# Altium integrated library pca20072.IntLib: 63 symbols (part 1 of 2)
Pins are listed as number, name and electrical type; pins without a type are passive.

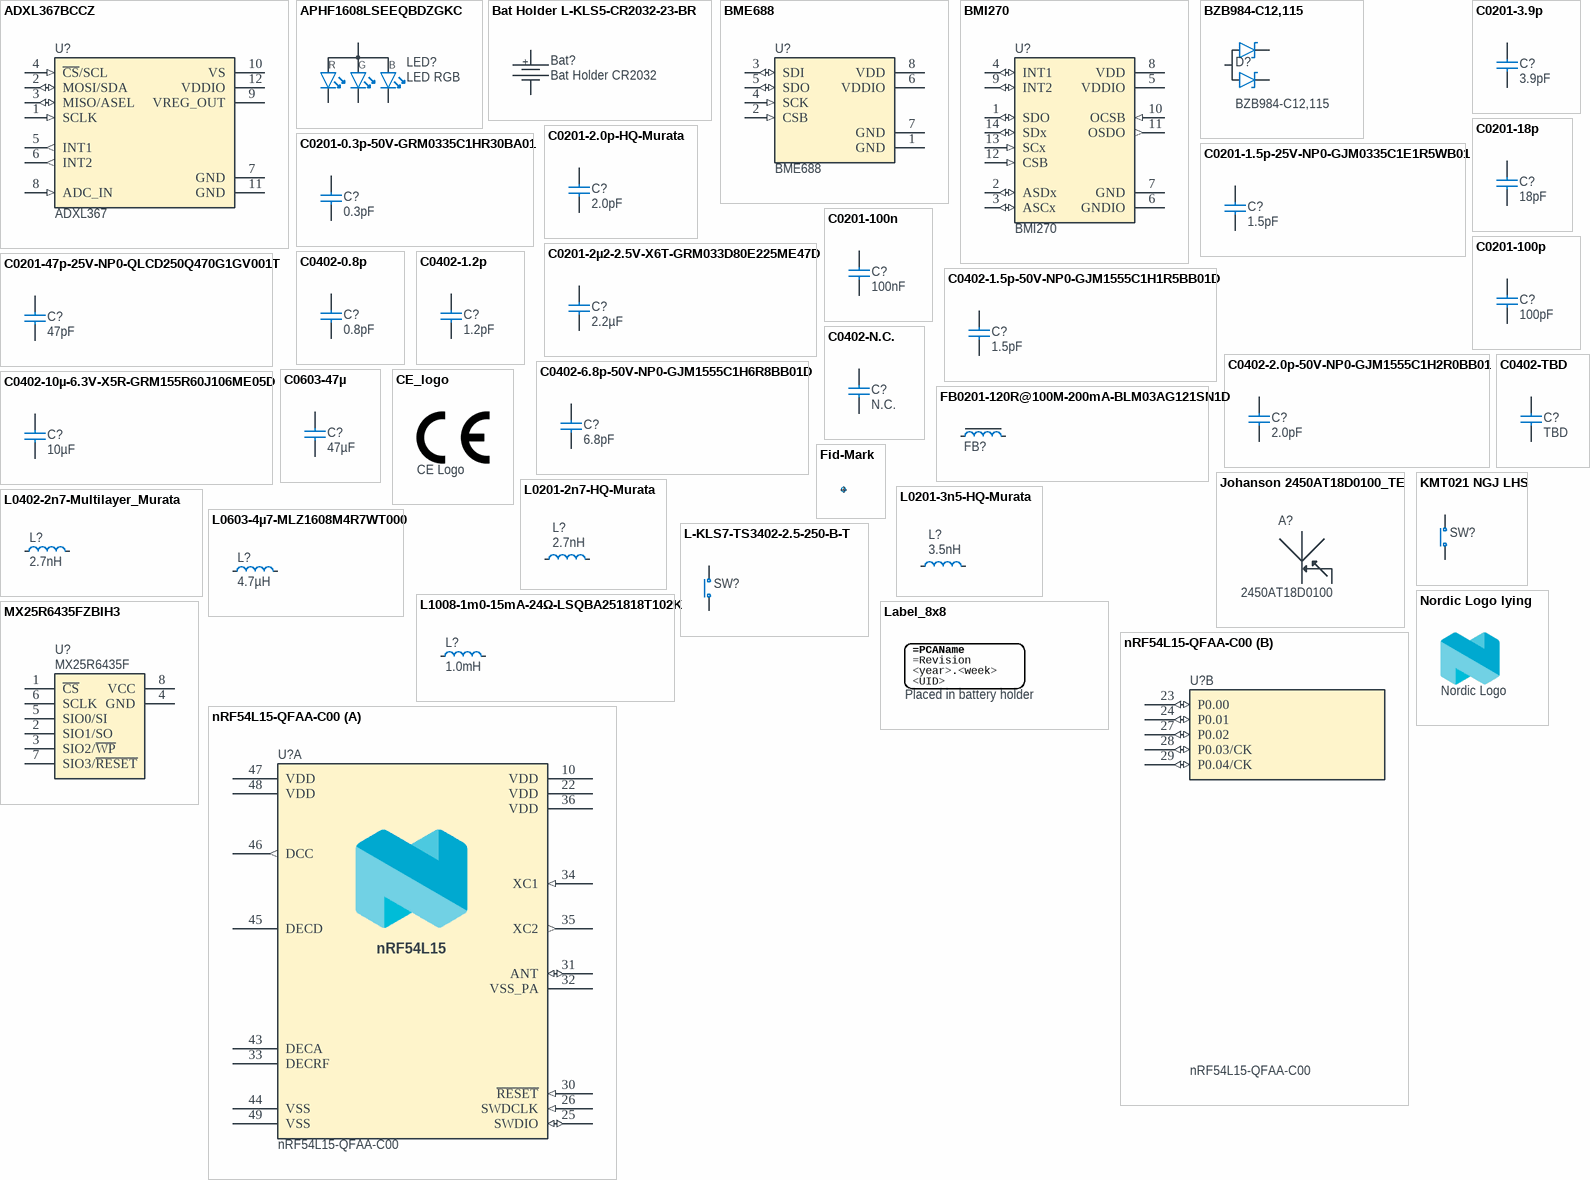
[diagram p0: symbols ADXL367BCCZ to nRF54L15-QFAA-C00]

## ADXL367BCCZ
designator U?, comment ADXL367
Micropower, 3-Axis, ±2 g/±4 g/±8 g Digital Output MEMS Accelerometer; Part Number: ADXL367BCCZ; Manufacturer: Analog Devices; Part number NEMS: 101900775; Note: N.A.; Component Status: Active; Pad Count: 12; Manufacturer Part Number: ADXL367BCCZ; ComponentLink1URL: http://www.analog.com/media/en/technical-documentation/data-sheets/ADXL367.pdf; ComponentLink1Description: Datasheet; ComponentLink2URL: https://www.digikey.com/en/products/detail/analog-devices-inc/ADXL367BCCZ-RL7/16360579; ComponentLink2Description: Supplier link; HelpURL: http://www.analog.com/en/products/ADXL367.html; Footprint Doc: LGA-12; LatestRevisionDate: 2023-04-03; Published: 2023-04-03; Value: ADXL367; Supplier 1: DigiKey; Supplier Part Number 1: 505-ADXL367BCCZ-RL7CT-ND; Supplier 2: Mouser; Supplier Part Number 2: 584-ADXL367BCCZ-RL7; Artikkelnr Noca: N.A.; Part number IPS: N.A.; Component Class: Misc_ICs; Author: rubr; Part number Norautron: N.A.; PartId: 101900775
footprint LGA50P220X230X97-12N
pins: 1 SCLK (in), 2 MOSI/SDA (io), 3 MISO/ASEL (io), 4 ~{CS}/SCL (in), 5 INT1 (out), 6 INT2 (out), 7 GND (power), 8 ADC_IN (in), 9 VREG_OUT (power), 10 VS (power), 11 GND (power), 12 VDDIO (power)

## APHF1608LSEEQBDZGKC
designator LED?, comment LED RGB
RGB LED 1.60 mm x 0.80 mm SMD; Part Number: APHF1608LSEEQBDZGKC; Manufacturer: Kingbright Company LLC; Part number IPS: 00000001254; Part number Norautron: 26470023; Part number NEMS: 101400123; Note: N.A.; Pad Count: 4; Component Status: Active; Manufacturer Part Number: APHF1608LSEEQBDZGKC; LatestRevisionDate: 2017-11-09; Published: 2017-09-18; Value: LED RGB; Artikkelnr Noca: N.A.; Footprint Doc: LED_RGB_0603; ComponentLink1Description: Datasheet; ComponentLink1URL: N.A.; ComponentLink2Description: Supplier link; ComponentLink2URL: N.A.; HelpURL: http://www.kingbrightusa.com/images/catalog/SPEC/APHF1608LSEEQBDZGKC.pdf; Supplier 1: DigiKey; Supplier Part Number 1: 754-2143-1-ND; Supplier 2: N.A.; Supplier Part Number 2: N.A.; PartId: 101400123; Component Class: Optoelectronics; Author: rsk
footprint LED_RGB_0603
pins: 1 C_RED, 2 C_GREEN, 3 C_BLUE, 4 A
text: R; G; B

## Bat Holder L-KLS5-CR2032-23-BR
designator Bat?, comment Bat Holder CR2032
Bat Holder CR2032 SMD; Part Number: Bat Holder L-KLS5-CR2032-23-BR; Manufacturer: KLS Electronic; Manufacturer Part Number: L-KLS5-CR2032-23-BR; Part number NEMS: 100500651; Component Status: Active; Pad Count: 2; Artikkelnr Noca: N.A.; System: Connector; PartId: 100500651; Component Class: Connectors; Author: rsk; ComponentLink1URL: http://www.klsele.com/admin/product_upload/20151124103736KLS5-CR2032-23-B.pdf; ComponentLink1Description: Datasheet; ComponentLink2URL: N.A.; ComponentLink2Description: Supplier link; HelpURL: http://www.klsele.com/products/connectors/Coin-Cell-Holders-Series/4685.html; LatestRevisionDate: 2025-09-19; Published: 2019-08-28; Footprint Doc: CR2032_HOLDER; Value: Bat Holder CR2032; Note: Bat Holder CR2032; Supplier 1: Milexia; Supplier Part Number 1: L-KLS5-CR2032-23-BR; Supplier 2: Mouser; Supplier Part Number 2: 614-SMTU2032-LF; Part number IPS: N.A.; Part number Norautron: N.A.
footprint L-KLS5-CR2032-23-B1
pins: 1, 2
text: +

## BME688
designator U?
Low power gas, pressure, temperature & humidity sensor; Manufacturer: Bosch; Part number NEMS: 101900619; Component Status: Active; Pad Count: 8; Note: N.A.; Part Number: BME688; PartId: 101900619; Component Class: Misc_ICs; Author: rsk; Manufacturer Part Number: BME688; ComponentLink1URL: https://www.bosch-sensortec.com/media/boschsensortec/downloads/datasheets/bst-bme688-ds000.pdf; ComponentLink1Description: Datasheet; ComponentLink2Description: Supplier link; HelpURL: https://www.bosch-sensortec.com/products/environmental-sensors/gas-sensors/bme688/; LatestRevisionDate: 2024-10-03; Published: 2020-07-07; Footprint Doc: LGA-8; Value: BME688; Supplier 1: DigiKey; Supplier Part Number 1: 828-BME688TR-ND; Supplier 2: N.A.; Supplier Part Number 2: N.A.; Artikkelnr Noca: N.A.; Part number IPS: N.A.; Part number Norautron: N.A.
footprint BME680
pins: 1 GND (power), 2 CSB (in), 3 SDI (io), 4 SCK (in), 5 SDO (io), 6 VDDIO (power) "1.2V - 3.6V", 7 GND (power), 8 VDD (power) "1.71V - 3.6V"

## BMI270
designator U?
6-axis, smart, low-power, inertial measurement unit; Manufacturer: Bosch; Part number NEMS: 101900620; Note: N.A.; Pad Count: 14; Component Status: Active; Part Number: BMI270; Manufacturer Part Number: BMI270; ComponentLink1URL: https://www.bosch-sensortec.com/media/boschsensortec/downloads/datasheets/bst-bmi270-ds000.pdf; ComponentLink1Description: Datasheet; ComponentLink2URL: https://www.bosch-sensortec.com/products/motion-sensors/imus/bmi270.html; ComponentLink2Description: Supplier link; HelpURL: https://www.bosch-sensortec.com/media/boschsensortec/downloads/datasheets/bst-bmi270-ds000.pdf; Footprint Doc: LGA-14; LatestRevisionDate: 2021-08-03; Published: 2020-07-07; Value: BMI270; Supplier 1: DigiKey; Supplier Part Number 1: 828-1091-1-ND; Supplier 2: Mouser; Supplier Part Number 2: 262-BMI270; Artikkelnr Noca: N.A.; Part number IPS: N.A.; Component Class: Misc_ICs; PartId: 101900620; Author: rsk; Part number Norautron: N.A.
footprint BMI270
pins: 1 SDO (io), 2 ASDx (io), 3 ASCx (io), 4 INT1 (io), 5 VDDIO (power), 6 GNDIO (power), 7 GND (power), 8 VDD (power), 9 INT2 (io), 10 OCSB (in), 11 OSDO (out), 12 CSB (in), 13 SCx (in), 14 SDx (io)

## BZB984-C12,115
designator D?
Zener Diode Array, 1 Pair, Common Anode, 12V, 265mW, ±5%; Manufacturer: Nexperia; Part number NEMS: 101300214; Component Status: Active; Pad Count: 3; Note: N.A.; Part Number: BZB984-C12,115; Component Class: Semiconductors; Author: rubr; Manufacturer Part Number: BZB984-C12,115; ComponentLink1URL: https://assets.nexperia.com/documents/data-sheet/BZB984_SER.pdf; ComponentLink1Description: Datasheet; ComponentLink2URL: https://www.digikey.com/en/products/detail/nexperia-usa-inc/BZB984-C12-115/1155439; ComponentLink2Description: Supplier link; HelpURL: https://www.nexperia.com/product/BZB984-C12; LatestRevisionDate: 2025-01-30; Published: 2025-01-30; Footprint Doc: SOT-663; Value: BZB984-C12,115; Supplier 1: DigiKey; Supplier Part Number 1: 1727-1585-1-ND; Supplier 2: N.A.; Supplier Part Number 2: N.A.; Artikkelnr Noca: N.A.; Part number IPS: N.A.; Part number Norautron: N.A.; PartId: 101300214
footprint SOTFL50P160X60-3L
pins: 1 K1, 2 K2, 3 CA
1 alternate drawing of the same symbol

## C0201-0.3p-50V-GRM0335C1HR30BA01
designator C?, comment 0.3pF
Capacitor, C0G, ±0.1pF, 50V; Part Number: C0201-0.3p-50V-GRM0335C1HR30BA01; Manufacturer: Murata; Manufacturer Part Number: GRM0335C1HR30BA01; Part number NEMS: 100200650; Component Status: Active; Pad Count: 2; Artikkelnr Noca: N.A.; PartId: 100200650; Component Class: Capacitors; Author: masi; ComponentLink1URL: https://www.murata.com/en-global/products/productdetail?partno=GRM0335C1HR30BA01%23; ComponentLink1Description: Datasheet; ComponentLink2URL: N.A.; ComponentLink2Description: Supplier link; HelpURL: N.A.; LatestRevisionDate: 2024-01-10; Published: 2024-01-10; Footprint Doc: 0201; Value: 0.3pF; Note: 50V; Supplier 1: DigiKey; Supplier Part Number 1: 490-6135-2-ND; Supplier 2: Mouser; Supplier Part Number 2: 81-GRM0335C1HR30BA1D; Part number IPS: N.A.; Part number Norautron: N.A.
footprint CAPC0603X03L_C
pins: 1, 2

## C0201-1.5p-25V-NP0-GJM0335C1E1R5WB01
designator C?, comment 1.5pF
Capacitor, NP0, ±0.05pF, 25V, High Q; Part Number: C0201-1.5p-25V-NP0-GJM0335C1E1R5WB01; Manufacturer: Murata; Manufacturer Part Number: GJM0335C1E1R5WB01; Part number NEMS: 100200477; Component Status: Active; Pad Count: 2; Artikkelnr Noca: N.A.; PartId: 100200477; Component Class: Capacitors; Author: masi; ComponentLink1URL: https://search.murata.co.jp/Ceramy/image/img/A01X/G101/ENG/GJM0335C1E1R5WB01-01.pdf; ComponentLink1Description: Datasheet; ComponentLink2URL: N.A.; ComponentLink2Description: Supplier link; HelpURL: https://www.murata.com/products/productdetail?partno=GJM0335C1E1R5WB01%23; LatestRevisionDate: 2021-06-15; Published: 2021-06-15; Footprint Doc: 0201; Value: 1.5pF; Note: 25V; Supplier 1: DigiKey; Supplier Part Number 1: 490-11176-2-ND; Supplier 2: Mouser; Supplier Part Number 2: 81-GJM0335C1E1R5WB1D; Part number IPS: N.A.; Part number Norautron: N.A.
footprint CAPC0603X03L_C
pins: 1, 2

## C0201-2.0p-HQ-Murata
designator C?, comment 2.0pF
Capacitor, NP0, ±0.05pF, 25V; Part Number: C0201-2.0p-HQ-Murata; Manufacturer: Murata; Manufacturer Part Number: GJM0335C1E2R0WB01; Part number IPS: 00000001775; Part number NEMS: 100200419; Component Status: Active; Pad Count: 2; Artikkelnr Noca: N.A.; PartId: 100200419; Component Class: Capacitors; Author: rsk; ComponentLink1URL: N.A.; ComponentLink1Description: Datasheet; ComponentLink2URL: N.A.; ComponentLink2Description: Supplier link; HelpURL: https://psearch.en.murata.com/capacitor/product/GJM0335C1E2R0WB01%23.html; LatestRevisionDate: 2018-10-25; Published: 2018-10-25; Footprint Doc: 0201; Value: 2.0pF; Note: 25V; Supplier 1: N.A.; Supplier Part Number 1: N.A.; Supplier 2: N.A.; Supplier Part Number 2: N.A.; Part number Norautron: N.A.
footprint CAPC0603X03L_C
pins: 1, 2

## C0201-2µ2-2.5V-X6T-GRM033D80E225ME47D
designator C?, comment 2.2µF
Capacitor, Ceramic, 2.2µF 2.5V X6T 0201,±20%; Part Number: C0201-2µ2-2.5V-X6T-GRM033D80E225ME47D; Manufacturer: Murata; Manufacturer Part Number: GRM033D80E225ME47D; Part number NEMS: 100200527; Component Status: Active; Pad Count: 2; Note: 2.5V, 20%, X6T; Artikkelnr Noca: N.A.; Component Class: Capacitors; Author: stl1; ComponentLink1URL: https://www.murata.com/products/productdetail?partno=GRM033D80E225ME47%23; ComponentLink1Description: Datasheet; ComponentLink2URL: N.A.; ComponentLink2Description: Supplier link; HelpURL: N.A.; LatestRevisionDate: 2022-02-27; Published: 2022-02-27; Footprint Doc: 0201; Value: 2.2µF; Supplier 1: Mouser; Supplier Part Number 1: 81-GRM033D80E225ME7D; Supplier 2: DigiKey; Supplier Part Number 2: 490-18653-1-ND; Part number IPS: N.A.; Part number Norautron: N.A.; PartId: 100200527
footprint CAPC0603X03L_C
pins: 1, 2

## C0201-3.9p
designator C?, comment 3.9pF
Chip Cap 0201; Part Number: C0201-3.9p; Manufacturer: N.A.; Part number NEMS: 100200024,100200424; Component Status: Active; Pad Count: 2; Note: Chip Cap 1%; PartId: 100200024; Component Class: Capacitors; Author: rsk; Manufacturer Part Number: N.A.; ComponentLink1URL: N.A.; ComponentLink1Description: Datasheet; ComponentLink2URL: N.A.; ComponentLink2Description: Supplier link; HelpURL: N.A.; LatestRevisionDate: 2014-11-13; Published: 2014-11-13; Footprint Doc: 0201; Value: 3.9pF; Supplier 1: N.A.; Supplier Part Number 1: N.A.; Supplier 2: N.A.; Supplier Part Number 2: N.A.; Artikkelnr Noca: N.A.; Part number IPS: N.A.; Part number Norautron: N.A.
footprint CAPC0603X03L_C
pins: 1, 2

## C0201-18p
designator C?, comment 18pF
Capacitor, C0G, ±5%, 25V; Part Number: C0201-18p; Manufacturer: Walsin Technology Corporation; Manufacturer Part Number: 0201N180J250CT; Part number IPS: 00000000862; Part number Norautron: 26207023; Part number NEMS: 100200035; Component Status: Active; Pad Count: 2; Note: Chip Cap 5%; Artikkelnr Noca: N.A.; PartId: 100200035; Component Class: Capacitors; Author: rsk; ComponentLink1URL: N.A.; ComponentLink1Description: Datasheet; ComponentLink2URL: N.A.; ComponentLink2Description: Supplier link; HelpURL: N.A.; LatestRevisionDate: 2020-10-13; Published: 2014-11-13; Footprint Doc: 0201; Value: 18pF; Supplier 1: N.A.; Supplier Part Number 1: N.A.; Supplier 2: N.A.; Supplier Part Number 2: N.A.
footprint CAPC0603X03L_C
pins: 1, 2

## C0201-47p-25V-NP0-QLCD250Q470G1GV001T
designator C?, comment 47pF
Capacitor, High Q, Low Loss, C0G/NP0, 25V, ±2%, -55°C ~ 125°C; Part Number: C0201-47p-25V-NP0-QLCD250Q470G1GV001T; Manufacturer: Johanson Technology; Manufacturer Part Number: QLCD250Q470G1GV001T; Part number IPS: 00000010810; Component Status: Active; Pad Count: 2; Artikkelnr Noca: N.A.; Component Class: Capacitors; Author: rubr; ComponentLink1URL: https://www.johansontechnology.com/search/pn-pdf/QLCD250Q470G1GV001T/; ComponentLink1Description: Datasheet; ComponentLink2URL: https://www.digikey.com/en/products/detail/johanson-technology-inc/QLCD250Q470G1GV001T/1561502; ComponentLink2Description: Supplier link; HelpURL: https://www.johansontechnology.com/products/rf-capacitors/high-q-multilayer-capacitors/0201-lseries/; LatestRevisionDate: 2026-04-13; Published: 2026-04-13; Footprint Doc: 0201; Value: 47pF; Note: 25V; Supplier 1: DigiKey; Supplier Part Number 1: 712-QLCD250Q470G1GV001TCT-ND; Supplier 2: N.A.; Supplier Part Number 2: N.A.; Part number Norautron: N.A.
footprint CAPC0603X03L_C
pins: 1, 2

## C0201-100n
designator C?, comment 100nF
Capacitor, X5R, ±10%, 100nF, 16V; Part Number: C0201-100n; Manufacturer: N.A.; Part number IPS: 00000001248, 00000002505; Part number Norautron: 262071862; Part number NEMS: 100200078; Pad Count: 2; Component Status: Active; Manufacturer Part Number: N.A.; Footprint Doc: 0201; LatestRevisionDate: 2024-06-27; Published: 2014-11-13; Value: 100nF; Note: 16V; Artikkelnr Noca: N.A.; ComponentLink1URL: N.A.; ComponentLink1Description: Datasheet; ComponentLink2URL: N.A.; ComponentLink2Description: Supplier link; HelpURL: N.A.; Supplier 1: N.A.; Supplier Part Number 1: N.A.; Supplier 2: N.A.; Supplier Part Number 2: N.A.; Component Class: Capacitors; Author: rsk; PartId: 100200078
footprint CAPC0603X03L_C
pins: 1, 2

## C0201-100p
designator C?, comment 100pF
Capacitor, NP0, ±2%, 25V; Part Number: C0201-100p; Manufacturer: Murata; Manufacturer Part Number: GRM0335C1E101GA01D; Part number IPS: 00000007853; Part number NEMS: 100200044; Component Status: Active; Pad Count: 2; Artikkelnr Noca: N.A.; PartId: 100200044; Component Class: Capacitors; Author: rsk; ComponentLink1URL: N.A.; ComponentLink1Description: Datasheet; ComponentLink2URL: N.A.; ComponentLink2Description: Supplier link; HelpURL: N.A.; LatestRevisionDate: 2019-04-16; Published: 2019-04-16; Footprint Doc: 0201; Value: 100pF; Note: 25V; Supplier 1: N.A.; Supplier Part Number 1: N.A.; Supplier 2: N.A.; Supplier Part Number 2: N.A.; Part number Norautron: N.A.
footprint CAPC0603X03L_C
pins: 1, 2

## C0402-0.8p
designator C?, comment 0.8pF
Capacitor, NP0, ±5%; Part Number: C0402-0.8p; Manufacturer: Murata; Manufacturer Part Number: GRM1555C1HR80WA01D; Part number IPS: 00000007782; Part number Norautron: N.A.; Part number NEMS: 100200116; Component Status: Active; Pad Count: 2; Note: 50V; Artikkelnr Noca: 20029147; PartId: 100200116; Component Class: Capacitors; Author: rsk; ComponentLink1URL: https://www.murata.com/~/media/webrenewal/support/library/catalog/products/capacitor/mlcc/c02e.ashx?la=en-us; ComponentLink1Description: Datasheet; ComponentLink2URL: N.A.; ComponentLink2Description: Supplier link; HelpURL: N.A.; LatestRevisionDate: 2012-11-21; Published: 2009-05-08; Footprint Doc: 0402; Value: 0.8pF; Supplier 1: DigiKey; Supplier Part Number 1: 490-6270-1-ND; Supplier 2: N.A.; Supplier Part Number 2: N.A.
footprint CAPC1005X04L
footprint CAPC1005X04L_C2
pins: 1, 2

## C0402-1.2p
designator C?, comment 1.2pF
Capacitor, NP0, ±0.1pF; Part Number: C0402-1.2p; Manufacturer: N.A.; Part number IPS: 00000005410; Part number NEMS: 100200119; Component Status: Active; Pad Count: 2; Note: 50V; Artikkelnr Noca: 20029157; PartId: 100200119; Component Class: Capacitors; Author: rsk; Manufacturer Part Number: N.A.; ComponentLink1URL: N.A.; ComponentLink1Description: Datasheet; ComponentLink2URL: N.A.; ComponentLink2Description: Supplier link; HelpURL: N.A.; LatestRevisionDate: 2011-05-11; Published: 2009-05-08; Footprint Doc: 0402; Value: 1.2pF; Supplier 1: N.A.; Supplier Part Number 1: N.A.; Supplier 2: N.A.; Supplier Part Number 2: N.A.; Part number Norautron: N.A.
footprint CAPC1005X04L
footprint CAPC1005X04L_C2
pins: 1, 2

## C0402-1.5p-50V-NP0-GJM1555C1H1R5BB01D
designator C?, comment 1.5pF
Capacitor, High Q, Low Loss, C0G/NP0, 50V, ±0.1pF, -55°C ~ 125°C; Part Number: C0402-1.5p-50V-NP0-GJM1555C1H1R5BB01D; Manufacturer: Murata; Manufacturer Part Number: GJM1555C1H1R5BB01D; Part number IPS: 80000004967; Component Status: Active; Pad Count: 2; Artikkelnr Noca: N.A.; Component Class: Capacitors; Author: rubr; ComponentLink1URL: https://search.murata.co.jp/Ceramy/image/img/A01X/G101/ENG/GJM1555C1H1R5BB01-01.pdf; ComponentLink1Description: Datasheet; ComponentLink2URL: https://www.digikey.com/en/products/detail/murata-electronics/GJM1555C1H1R5BB01D/2592887; ComponentLink2Description: Supplier link; HelpURL: https://pim.murata.com/en-global/pim/details/?partNum=GJM1555C1H1R5BB01%23; LatestRevisionDate: 2026-04-13; Published: 2026-04-13; Footprint Doc: 0402; Value: 1.5pF; Note: 50V; Supplier 1: DigiKey; Supplier Part Number 1: 490-8087-1-ND; Supplier 2: N.A.; Supplier Part Number 2: N.A.; Part number Norautron: N.A.
footprint CAPC1005X04L
footprint CAPC1005X04L_C2
pins: 1, 2

## C0402-2.0p-50V-NP0-GJM1555C1H2R0BB01
designator C?, comment 2.0pF
Capacitor, High Q, Low Loss, C0G/NP0, 50V, ±0.1pF, -55°C ~ 125°C; Part Number: C0402-2.0p-50V-NP0-GJM1555C1H2R0BB01; Manufacturer: Murata; Manufacturer Part Number: GJM1555C1H2R0BB01; Part number IPS: 80000004957; Part number NEMS: 100200697; Component Status: Active; Pad Count: 2; Artikkelnr Noca: N.A.; Component Class: Capacitors; Author: rubr; ComponentLink1URL: https://search.murata.co.jp/Ceramy/image/img/A01X/G101/ENG/GJM1555C1H2R0BB01-01.pdf; ComponentLink1Description: Datasheet; ComponentLink2URL: https://www.digikey.com/en/products/detail/murata-electronics/GJM1555C1H2R0BB01D/2592912; ComponentLink2Description: Supplier link; HelpURL: https://pim.murata.com/en-global/pim/details/?partNum=GJM1555C1H2R0BB01%23; LatestRevisionDate: 2026-04-13; Published: 2025-04-23; Footprint Doc: 0402; Value: 2.0pF; Note: 50V; Supplier 1: DigiKey; Supplier Part Number 1: 490-8091-1-ND; Supplier 2: N.A.; Supplier Part Number 2: N.A.; Part number Norautron: N.A.; PartId: 100200697
footprint CAPC1005X04L
footprint CAPC1005X04L_C2
pins: 1, 2

## C0402-6.8p-50V-NP0-GJM1555C1H6R8BB01D
designator C?, comment 6.8pF
Capacitor, High Q, Low Loss, C0G/NP0, 50V, ±0.1pF, -55°C ~ 125°C; Part Number: C0402-6.8p-50V-NP0-GJM1555C1H6R8BB01D; Manufacturer: Murata; Manufacturer Part Number: GJM1555C1H6R8BB01D; Part number IPS: 80000004966; Component Status: Active; Pad Count: 2; Artikkelnr Noca: N.A.; Component Class: Capacitors; Author: rubr; ComponentLink1URL: https://search.murata.co.jp/Ceramy/image/img/A01X/G101/ENG/GJM1555C1H6R8BB01-01.pdf; ComponentLink1Description: Datasheet; ComponentLink2URL: https://www.digikey.com/en/products/detail/murata-electronics/GJM1555C1H6R8BB01D/2593097; ComponentLink2Description: Supplier link; HelpURL: https://pim.murata.com/en-global/pim/details/?partNum=GJM1555C1H6R8BB01%23; LatestRevisionDate: 2026-04-13; Published: 2026-04-13; Footprint Doc: 0402; Value: 6.8pF; Note: 50V; Supplier 1: DigiKey; Supplier Part Number 1: 490-12599-1-ND; Supplier 2: N.A.; Supplier Part Number 2: N.A.; Part number Norautron: N.A.
footprint CAPC1005X04L
footprint CAPC1005X04L_C2
pins: 1, 2

## C0402-10µ-6.3V-X5R-GRM155R60J106ME05D
designator C?, comment 10µF
Capacitor, X5R, ±20%, 6.3V; Part Number: C0402-10µ-6.3V-X5R-GRM155R60J106ME05D; Manufacturer: Murata; Manufacturer Part Number: GRM155R60J106ME05D; Part number NEMS: 100200554; Component Status: Active; Pad Count: 2; Artikkelnr Noca: N.A.; PartId: 100200554; Component Class: Capacitors; Author: eisk; ComponentLink1URL: https://www.murata.com/products/productdetail?partno=GRM155R60J106ME05%23; ComponentLink1Description: Datasheet; ComponentLink2URL: N.A.; ComponentLink2Description: Supplier link; HelpURL: https://www.murata.com/products/productdetail?partno=GRM155R60J106ME05%23; LatestRevisionDate: 2023-08-01; Published: 2023-08-01; Footprint Doc: 0402; Value: 10µF; Note: 6.3V; Supplier 1: DigiKey; Supplier Part Number 1: 490-GRM155R60J106ME05DTR-ND; Supplier 2: Mouser; Supplier Part Number 2: 81-GRM155C81C225KE1D; Part number IPS: N.A.; Part number Norautron: N.A.
footprint CAPC1005X04L_C2
pins: 1, 2

## C0402-N.C.
designator C?, comment N.C.
Not mounted; Part Number: C0402-N.C.; Manufacturer: N.A.; Part number NEMS: 100200105; Component Status: Active; Pad Count: 2; Note: Chip Cap; Assembly: Not mounted; PartId: 100200105; Component Class: Capacitors; Author: rsk; Manufacturer Part Number: N.A.; ComponentLink1URL: N.A.; ComponentLink1Description: Datasheet; ComponentLink2URL: N.A.; ComponentLink2Description: Supplier link; HelpURL: N.A.; LatestRevisionDate: 2009-05-08; Published: 2009-05-08; Footprint Doc: 0402; Value: N.C.; Supplier 1: N.A.; Supplier Part Number 1: N.A.; Supplier 2: N.A.; Supplier Part Number 2: N.A.; Artikkelnr Noca: N.A.; Part number IPS: N.A.; Part number Norautron: N.A.
footprint CAPC1005X04L_C2
pins: 1, 2

## C0402-TBD
designator C?, comment TBD
Chip Cap 0402; Part Number: C0402-TBD; Manufacturer: N.A.; Part number NEMS: 100200106; Pad Count: 2; Component Status: Active; Manufacturer Part Number: N.A.; Footprint Doc: 0402; LatestRevisionDate: 2010-12-21; Published: 2010-12-21; Value: TBD; Note: Chip Cap; Artikkelnr Noca: N.A.; Part number IPS: N.A.; ComponentLink1URL: N.A.; ComponentLink1Description: Datasheet; ComponentLink2URL: N.A.; ComponentLink2Description: Supplier link; HelpURL: N.A.; Supplier 1: N.A.; Supplier Part Number 1: N.A.; Supplier 2: N.A.; Supplier Part Number 2: N.A.; Component Class: Capacitors; PartId: 100200106; Author: rsk; Part number Norautron: N.A.
footprint CAPC1005X04L
footprint CAPC1005X04L_C2
pins: 1, 2

## C0603-47µ
designator C?, comment 47µF
Capacitor, X5R, ±20%, 6.3V; Part Number: C0603-47µ; Manufacturer: N.A.; Part number IPS: 00000001818; Part number NEMS: 100200277; Component Status: Active; Pad Count: 2; PartId: 100200277; Component Class: Capacitors; Author: rsk; Manufacturer Part Number: N.A.; ComponentLink1URL: N.A.; ComponentLink1Description: Datasheet; ComponentLink2URL: N.A.; ComponentLink2Description: Supplier link; HelpURL: N.A.; LatestRevisionDate: 2020-04-28; Published: 2016-04-16; Footprint Doc: 0603; Value: 47µF; Note: 6.3V; Supplier 1: N.A.; Supplier Part Number 1: N.A.; Supplier 2: N.A.; Supplier Part Number 2: N.A.; Artikkelnr Noca: N.A.; Part number Norautron: N.A.
footprint CAPC1608X06L
pins: 1, 2

## CE_logo
designator LOGO?, comment CE Logo  (no BOM)
CE (Conformité_Européenne) logo; Part Number: CE_logo; Manufacturer: N.A.; Part number NEMS: 101100010; Component Status: Active; Pad Count: 0; PartId: 101100010; Component Class: Markings; Author: daba; Manufacturer Part Number: N.A.; ComponentLink1URL: N.A.; ComponentLink1Description: Datasheet; ComponentLink2URL: N.A.; ComponentLink2Description: Supplier link; HelpURL: N.A.; LatestRevisionDate: 2024-11-26; Published: 2024-11-26; Footprint Doc: CE_logo; Value: CE Logo; Note: N.A.; Supplier 1: N.A.; Supplier Part Number 1: N.A.; Supplier 2: N.A.; Supplier Part Number 2: N.A.; Artikkelnr Noca: N.A.; Part number IPS: N.A.; Part number Norautron: N.A.
footprint CE_logo

## FB0201-120R@100M-200mA-BLM03AG121SN1D
designator FB?, comment 120R/0.2A  (value not drawn)
Ferrite Bead, 120 Ohm @ 100MHz, 200mA, 500 mOhm Max; Part Number: FB0201-120R@100M-200mA-BLM03AG121SN1D; Manufacturer: Murata; Manufacturer Part Number: BLM03AG121SN1D; Part number NEMS: 100300419; Component Status: Active; Pad Count: 2; Artikkelnr Noca: N.A.; Component Class: Inductors; Author: stl1; ComponentLink1URL: https://www.murata.com/en-eu/products/productdetail?partno=BLM03AG121SN1%23; ComponentLink1Description: Datasheet; ComponentLink2URL: N.A.; ComponentLink2Description: Supplier link; HelpURL: N.A.; LatestRevisionDate: 2022-02-27; Published: 2022-02-27; Footprint Doc: 0201; Value: 120R/0.2A; Note: Ferrite Bead; Supplier 1: DigiKey; Supplier Part Number 1: 490-5622-1-ND; Supplier 2: Mouser; Supplier Part Number 2: 81-BLM03AX121SN1D; Part number IPS: N.A.; Part number Norautron: N.A.; PartId: 100300419
footprint INDC0603X03L_C
pins: 1, 2

## Fid-Mark
designator Fid?, comment Fiducial mark  (value not drawn)
Part Number: Fid-Mark; Manufacturer: N.A.; Part number NEMS: 100500073; Value: N.A.; Pad Count: 1; Component Status: Active; System: Connector; Manufacturer Part Number: N.A.; LatestRevisionDate: 2009-12-12; Published: 2009-12-12; Note: N.A.; Artikkelnr Noca: N.A.; Footprint Doc: Fiducial; PartId: 100500073; Component Class: Connectors; Author: rsk; ComponentLink1URL: N.A.; ComponentLink1Description: Datasheet; ComponentLink2URL: N.A.; ComponentLink2Description: Supplier link; HelpURL: N.A.; Supplier 1: N.A.; Supplier Part Number 1: N.A.; Supplier 2: N.A.; Supplier Part Number 2: N.A.; Part number IPS: N.A.; Part number Norautron: N.A.
footprint Fiducial

## Johanson 2450AT18D0100_TE
designator A?, comment 2450AT18D0100
2.45 GHz chip antenna; Part Number: Johanson 2450AT18D0100_TE; Manufacturer: Johanson Technology; Part number IPS: 00000001415; Part number NEMS: 100700004, 100700005, 100700006; Component Status: Active; Pad Count: 4; Note: N.A.; Artikkelnr Noca: 53059035; PartId: 100700006; Component Class: Antennas; Author: rsk; Manufacturer Part Number: 2450AT18D0100; ComponentLink1URL: N.A.; ComponentLink1Description: Datasheet; ComponentLink2URL: N.A.; ComponentLink2Description: Supplier link; HelpURL: http://www.johansontechnology.com/datasheets/antennas/2450AT18D0100.pdf; LatestRevisionDate: 2025-01-07; Published: 2016-01-12; Footprint Doc: 2450AT18D0100; Value: 2450AT18D0100; Supplier 1: DigiKey; Supplier Part Number 1: 2450AT18D0100E; Supplier 2: Mouser; Supplier Part Number 2: 609-2450AT18D0100E; Part number Norautron: N.A.
footprint 2450AT18D0100_TE-L
footprint 2450AT18D0100_TE-R
pins: 1, 2 GND (power) hidden to GND, 3 Tuning

## KMT021 NGJ LHS
designator SW?, comment PB SW  (value not drawn)
Nano-Miniature Top Actuated Tact Switch with extended life 3.0x2.6mm; Part Number: KMT021 NGJ LHS; Manufacturer: C&K; Part number IPS: 00000005416; Part number NEMS: 101500039; Note: N.A.; Pad Count: 4; Component Status: Active; Manufacturer Part Number: KMT021 NGJ LHS; Footprint Doc: SW_TACTILE_2.6x3.0MM_4-LEAD; LatestRevisionDate: 2013-08-12; Published: 2013-08-12; Value: PB SW; Artikkelnr Noca: N.A.; ComponentLink1URL: N.A.; ComponentLink1Description: Datasheet; ComponentLink2URL: N.A.; ComponentLink2Description: Supplier link; HelpURL: http://media.digikey.com/pdf/Data%20Sheets/C&K/KMT_0xx_NGJ_LHS_Drawing.pdf; Supplier 1: DigiKey; Supplier Part Number 1: CKN10289CT-ND; Supplier 2: Farnell; Supplier Part Number 2: 190-8260; Component Class: Switches; PartId: 101500039; Author: rsk; Part number Norautron: N.A.
footprint SW_TACTILE_2.6x3.0MM_4-LEAD
pins: 1 N.O, 2 COM

## L0201-2n7-HQ-Murata
designator L?, comment 2.7nH
Inductor, 600mA, ±0.1ｎH, 120mOhm; Part Number: L0201-2n7-HQ-Murata; Manufacturer: Murata; Manufacturer Part Number: LQP03HQ2N7B02; Part number IPS: 00000001753; Part number NEMS: 100300214; Component Status: Active; Pad Count: 2; Note: -55°C ~ 125°C; Artikkelnr Noca: N.A.; PartId: 100300214; Component Class: Inductors; Author: rsk; ComponentLink1URL: https://search.murata.co.jp/Ceramy/image/img/P02/JELF243C-0021.pdf; ComponentLink1Description: Datasheet; ComponentLink2URL: N.A.; ComponentLink2Description: Supplier link; HelpURL: https://psearch.en.murata.com/inductor/product/LQP03HQ2N7B02%23.html; LatestRevisionDate: 2018-10-23; Published: 2018-10-23; Footprint Doc: 0201; Value: 2.7nH; Supplier 1: DigiKey; Supplier Part Number 1: 490-13909-1-ND; Supplier 2: N.A.; Supplier Part Number 2: N.A.; Part number Norautron: N.A.
footprint INDC0603X03L_C
pins: 1, 2

## L0201-3n5-HQ-Murata
designator L?, comment 3.5nH
Inductor, 500mA, ±0.1ｎH, 170mOhm; Part Number: L0201-3n5-HQ-Murata; Manufacturer: Murata; Manufacturer Part Number: LQP03HQ3N5B02; Part number NEMS: 100300222; Component Status: Active; Pad Count: 2; Note: -55°C ~ 125°C; Artikkelnr Noca: N.A.; PartId: 100300222; Component Class: Inductors; Author: rsk; ComponentLink1URL: https://search.murata.co.jp/Ceramy/image/img/P02/JELF243C-0021.pdf; ComponentLink1Description: Datasheet; ComponentLink2URL: N.A.; ComponentLink2Description: Supplier link; HelpURL: https://psearch.en.murata.com/inductor/product/LQP03HQ3N5B02%23.html; LatestRevisionDate: 2018-10-23; Published: 2018-10-23; Footprint Doc: 0201; Value: 3.5nH; Supplier 1: DigiKey; Supplier Part Number 1: 490-13925-1-ND; Supplier 2: N.A.; Supplier Part Number 2: N.A.; Part number IPS: N.A.; Part number Norautron: N.A.
footprint INDC0603X03L_C
pins: 1, 2

## L0402-2n7-Multilayer_Murata
designator L?, comment 2.7nH
Inductor, 800mA, ±2%, 120mΩ; Part Number: L0402-2n7-Multilayer_Murata; Manufacturer: Murata; Manufacturer Part Number: LQG15HS2N7B02D; Part number NEMS: 100300445; Component Status: Active; Pad Count: 2; Note: -55°C ~ 125°C; Artikkelnr Noca: N.A.; PartId: 100300445; Component Class: Inductors; Author: hany; ComponentLink1URL: https://search.murata.co.jp/Ceramy/image/img/P02/JELF243B-0010.pdf; ComponentLink1Description: Datasheet; ComponentLink2URL: N.A.; ComponentLink2Description: Supplier link; HelpURL: https://search.murata.co.jp/Ceramy/image/img/P02/JELF243B-0010.pdf; LatestRevisionDate: 2023-06-06; Published: 2023-06-06; Footprint Doc: 0402; Value: 2.7nH; Supplier 1: DigiKey; Supplier Part Number 1: 490-LQG15HS2N7B02DTR-ND; Supplier 2: Mouser; Supplier Part Number 2: 81-LQG15HS2N7B02D; Part number IPS: N.A.; Part number Norautron: N.A.
footprint INDC1005X04L_C2 (Chip Inductor, 2-Leads, Body 1.0x0.5mm, IPC High Density)
pins: 1, 2

## L0603-4µ7-MLZ1608M4R7WT000
designator L?, comment 4.7µH
Inductor, 120mA, ±20%, 0.65R; Part Number: L0603-4µ7-MLZ1608M4R7WT000; Manufacturer: TDK Corporation; Manufacturer Part Number: MLZ1608M4R7WT000; Part number NEMS: 100300440; Component Status: Active; Pad Count: 2; Note: Power Inductor ±20%; Artikkelnr Noca: N.A.; PartId: 100300440; Component Class: Inductors; Author: stl1; ComponentLink1URL: https://product.tdk.com/en/search/inductor/inductor/smd/info?part_no=MLZ1608M4R7WT000; ComponentLink1Description: Datasheet; ComponentLink2URL: N.A.; ComponentLink2Description: Supplier link; HelpURL: N.A.; LatestRevisionDate: 2023-05-10; Published: 2023-05-10; Footprint Doc: 0603; Value: 4.7µH; Supplier 1: DigiKey; Supplier Part Number 1: 445-6390-2-ND; Supplier 2: Mouser; Supplier Part Number 2: 810-MLZ1608M4R7WT000; Part number IPS: N.A.; Part number Norautron: N.A.
footprint INDC1608X06L
pins: 1, 2

## L1008-1m0-15mA-24Ω-LSQBA251818T102K
designator L?, comment 1.0mH
Inductor, 15mA, ±10%, 24Ω; Part Number: L1008-1m0-15mA-24Ω-LSQBA251818T102K; Manufacturer: Taiyo Yuden; Manufacturer Part Number: LSQBA251818T102K; Part number NEMS: 100300509; Component Status: Active; Pad Count: 2; Note: -40°C ~ 105°C; Artikkelnr Noca: N.A.; Component Class: Inductors; Author: rubr; ComponentLink1URL: https://ds.yuden.co.jp/TYCOMPAS/or/specSheet?pn=LSQBA251818T102K; ComponentLink1Description: Datasheet; ComponentLink2URL: https://www.digikey.com/en/products/detail/taiyo-yuden/LSQBA251818T102K/16661924; ComponentLink2Description: Supplier link; HelpURL: https://ds.yuden.co.jp/TYCOMPAS/or/detail?pn=LSQBA251818T102K&u=M; LatestRevisionDate: 2025-01-30; Published: 2025-01-30; Footprint Doc: 1008; Value: 1.0mH; Supplier 1: DigiKey; Supplier Part Number 1: 587-LSQBA251818T102KCT-ND; Supplier 2: N.A.; Supplier Part Number 2: N.A.; Part number IPS: N.A.; Part number Norautron: N.A.; PartId: 100300509
footprint INDC2520X10N
pins: 1, 2

## L-KLS7-TS3402-2.5-250-B-T
designator SW?, comment PB SW  (value not drawn)
Tactile Switch, SPNO, SMD, 260gf, 4.2x3.3x2.5mm; Part Number: L-KLS7-TS3402-2.5-250-B-T; Manufacturer: KLS Electronic; Part number NEMS: 101500152; Note: N.A.; Pad Count: 4; Component Status: Active; Manufacturer Part Number: L-KLS7-TS3402-2.5-250-B-T; LatestRevisionDate: 2026-02-09; Published: 2025-01-23; Value: PB SW; Artikkelnr Noca: N.A.; Footprint Doc: KLS-TS3402; Part number IPS: N.A.; ComponentLink1Description: Datasheet; ComponentLink1URL: https://img.klsele.com/admin/product_upload/20220406093556L-KLS7-TS3402.pdf; ComponentLink2Description: Supplier link; ComponentLink2URL: N.A.; HelpURL: https://www.klsele.com/products/Switches/Tactile-switches/4201.html; Supplier 1: Milexia; Supplier Part Number 1: L-KLS7-TS3402-2.5-250-B-T; Supplier 2: N.A.; Supplier Part Number 2: N.A.; PartId: 101500152; Component Class: Switches; Author: rubr; Part number Norautron: N.A.
footprint KLS-TS3402
pins: 1 N.O, 2 COM

## Label_8x8
designator LABEL?, comment Assembly: Placed in battery holder  (hidden comment: 8x8mm)
PCA version label, stick-on, 8x8mm; Part Number: Label_8x8; Manufacturer: Ellco Etikett; Manufacturer Part Number: A33511-01; Part number NEMS: 101200025; Component Status: Active; Pad Count: 0; Note: N.A.; PartId: 101200025; Component Class: Mechanicals; Author: hany; ComponentLink1URL: N.A.; ComponentLink1Description: Datasheet; ComponentLink2URL: N.A.; ComponentLink2Description: Supplier link; HelpURL: N.A.; LatestRevisionDate: 2023-01-05; Published: 2023-01-05; Footprint Doc: Label; Value: 8x8mm; Supplier 1: N.A.; Supplier Part Number 1: N.A.; Supplier 2: N.A.; Supplier Part Number 2: N.A.; Artikkelnr Noca: N.A.; Part number IPS: N.A.; Part number Norautron: N.A.
footprint LabelSilk_8x8
text: <year>.<week>; <UID>

## MX25R6435FZBIH3
designator U?, comment MX25R6435F
Ultra low power, 64M-bit, serial multi I/O flash memory; Part Number: MX25R6435FZBIH3; Manufacturer: Macronix; Part number NEMS: 101900860; Note: N.A.; Pad Count: 8; Component Status: Active; Manufacturer Part Number: MX25R6435FZBIH3; Footprint Doc: USON-8; LatestRevisionDate: 2025-02-11; Published: 2025-02-11; Value: MX25R6435F; Artikkelnr Noca: N.A.; Part number IPS: N.A.; ComponentLink1URL: https://www.macronix.com/Lists/Datasheet/Attachments/8868/MX25R6435F,%20Wide%20Range,%2064Mb,%20v1.6.pdf; ComponentLink1Description: Datasheet; ComponentLink2URL: https://www.digikey.com/en/products/detail/macronix/MX25R6435FZBIH3/21700503; ComponentLink2Description: Supplier link; HelpURL: https://www.macronix.com/en-us/products/NOR-Flash/Serial-NOR-Flash/Pages/spec.aspx?p=MX25R6435F&m=Serial%20NOR%20Flash&n=PM2138&epn=MX25R6435FZBIH3; Supplier 1: DigiKey; Supplier Part Number 1: 1092-MX25R6435FZBIH3CT-ND; Supplier 2: N.A.; Supplier Part Number 2: N.A.; Component Class: Misc_ICs; PartId: 101900860; Author: rubr; Part number Norautron: N.A.
footprint SON80P300X60_HS-9N
pins: 1 ~{CS}, 2 SIO1/SO, 3 SIO2/~{WP}, 4 GND, 5 SIO0/SI, 6 SCLK, 7 SIO3/~{RESET}, 8 VCC, 9 GND hidden to GND

## Nordic Logo lying
designator LOGO?, comment Nordic Logo  (no BOM)
Nordic logo lying; Manufacturer: N.A.; Part number NEMS: 101100001; Component Status: Active; Pad Count: 0; Part Number: Nordic Logo lying; PartId: 101100001; Component Class: Markings; Author: rsk; Manufacturer Part Number: N.A.; ComponentLink1URL: N.A.; ComponentLink1Description: Datasheet; ComponentLink2URL: N.A.; ComponentLink2Description: Supplier link; HelpURL: N.A.; LatestRevisionDate: 2017-03-20; Published: 2017-09-01; Footprint Doc: Nordic Logo; Value: Nordic Logo; Note: N.A.; Supplier 1: N.A.; Supplier Part Number 1: N.A.; Supplier 2: N.A.; Supplier Part Number 2: N.A.; Artikkelnr Noca: N.A.; Part number IPS: N.A.; Part number Norautron: N.A.
footprint NORDIC_LOGO_LYING

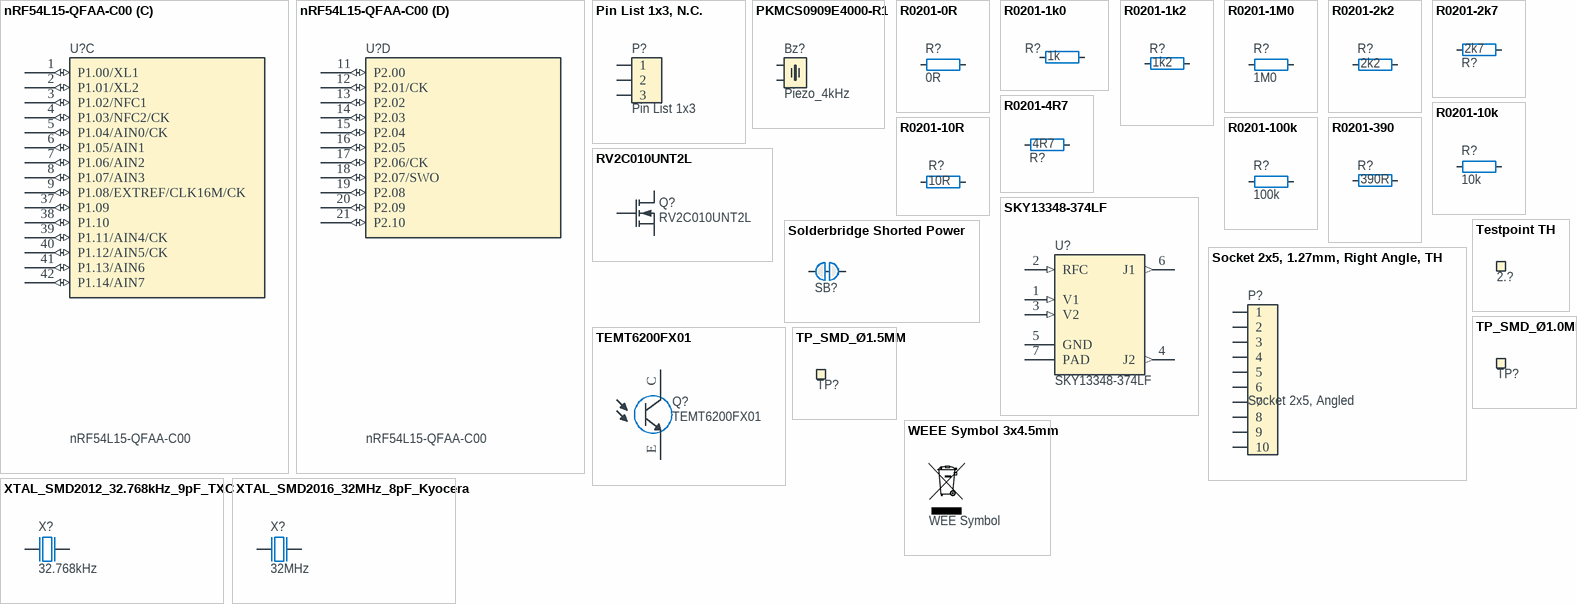
[diagram p1: symbols nRF54L15-QFAA-C00 to XTAL_SMD2016_32MHz_8pF_Kyocera]

## nRF54L15-QFAA-C00
designator U?
Multi-protocol Bluetooth Low Energy, IEEE 802.15.4 and 2.4GHz proprietary Wireless MCU; Manufacturer: Nordic Semiconductor; Part number NEMS: 102000382; Component Status: Active; Pad Count: 49; Note: N.A.; Part Number: nRF54L15-QFAA-C00; PartId: 102000382; Component Class: Nordic_Devices; Author: stl1; Manufacturer Part Number: nRF54L15-QFAA-C00; ComponentLink1URL: N.A.; ComponentLink1Description: Datasheet; ComponentLink2URL: N.A.; ComponentLink2Description: Supplier link; HelpURL: N.A.; LatestRevisionDate: 2025-01-30; Published: 2025-01-30; Footprint Doc: QFN-48; Value: nRF54L15-QFAA-C00; Supplier 1: Nordic Semiconductor; Supplier Part Number 1: nRF54L15-QFAA-C00; Supplier 2: N.A.; Supplier Part Number 2: N.A.; Artikkelnr Noca: N.A.; Part number IPS: N.A.; Part number Norautron: N.A.
footprint QFN49P40_600x600x90L40x20T460N
footprint QFN49P40_600x600x90L40x20T460L
footprint QFN40P600X600X90-48N
part A pins: 10 VDD (power), 22 VDD (power), 25 SWDIO (io), 26 SWDCLK (in), 30 ~{RESET} (in), 31 ANT (io), 32 VSS_PA (power), 33 DECRF (power), 34 XC1 (in), 35 XC2 (out), 36 VDD (power), 43 DECA (power), 44 VSS (power), 45 DECD (power), 46 DCC (out), 47 VDD (power), 48 VDD (power), 49 VSS (power)
part B pins: 23 P0.00 (io), 24 P0.01 (io), 27 P0.02 (io), 28 P0.03/CK (io), 29 P0.04/CK (io)
part C pins: 1 P1.00/XL1 (io), 2 P1.01/XL2 (io), 3 P1.02/NFC1 (io), 4 P1.03/NFC2/CK (io), 5 P1.04/AIN0/CK (io), 6 P1.05/AIN1 (io), 7 P1.06/AIN2 (io), 8 P1.07/AIN3 (io), 9 P1.08/EXTREF/CLK16M/CK (io), 37 P1.09 (io), 38 P1.10 (io), 39 P1.11/AIN4/CK (io), 40 P1.12/AIN5/CK (io), 41 P1.13/AIN6 (io), 42 P1.14/AIN7 (io)
part D pins: 11 P2.00 (io), 12 P2.01/CK (io), 13 P2.02 (io), 14 P2.03 (io), 15 P2.04 (io), 16 P2.05 (io), 17 P2.06/CK (io), 18 P2.07/SWO (io), 19 P2.08 (io), 20 P2.09 (io), 21 P2.10 (io)
part A text: nRF54L15

## Pin List 1x3, N.C.
designator P?, comment Pin List 1x3
Pin List 1x3, 2.54mm (100mil); Part Number: Pin List 1x3, N.C.; Manufacturer: N.A.; Part number NEMS: 100500305; Component Status: Active; Pad Count: 3; Assembly: Not mounted; System: Connector; PartId: 100500305; Component Class: Connectors; Author: rsk; Manufacturer Part Number: N.A.; ComponentLink1URL: N.A.; ComponentLink1Description: Datasheet; ComponentLink2URL: N.A.; ComponentLink2Description: Supplier link; HelpURL: N.A.; LatestRevisionDate: 2017-09-07; Published: 2017-09-07; Footprint Doc: LIST_1x3; Value: Pin List 1x3; Note: N.A.; Supplier 1: N.A.; Supplier Part Number 1: N.A.; Supplier 2: N.A.; Supplier Part Number 2: N.A.; Artikkelnr Noca: N.A.; Part number IPS: N.A.; Part number Norautron: N.A.
footprint LIST_1x3-NC
pins: 1, 2, 3

## PKMCS0909E4000-R1
designator Bz?, comment Piezo_4kHz
Piezo Buzzer, SMD, 9.0mm x 9.0mm x 1.9mm, 4kHz, 65dB @ 1.5V, <12.5Vp-p; Part Number: PKMCS0909E4000-R1; Manufacturer: Murata; Part number NEMS: 101000026; Component Status: Active; Pad Count: 2; Note: 1.5 ~ 12.5V; Artikkelnr Noca: N.A.; PartId: 101000026; Component Class: Transducers; Author: rsk; Manufacturer Part Number: PKMCS0909E4000-R1; ComponentLink1URL: N.A.; ComponentLink1Description: Datasheet; ComponentLink2URL: N.A.; ComponentLink2Description: Supplier link; HelpURL: https://www.murata.com/en-global/products/productdetail.aspx?partno=PKMCS0909E4000-R1; LatestRevisionDate: 2020-08-04; Published: 2020-08-04; Footprint Doc: Buzzer_PKMCS0909; Value: Piezo_4kHz; Supplier 1: DigiKey; Supplier Part Number 1: 490-9647-1-ND; Supplier 2: Mouser; Supplier Part Number 2: 81-PKMCS0909E4000-R1; Part number IPS: N.A.; Part number Norautron: N.A.
footprint Buzzer_PKMCS0909
pins: 1, 2

## R0201-0R
designator R?, comment 0R
Resistor, ±5%, 0.05W; Part Number: R0201-0R; Manufacturer: N.A.; Part number IPS: 00000003245; Part number NEMS: 100100001; Note: Chip Res 5%; Pad Count: 2; Component Status: Active; Manufacturer Part Number: N.A.; Footprint Doc: 0201; LatestRevisionDate: 2017-11-09; Published: 2014-11-13; Value: 0R; Artikkelnr Noca: N.A.; ComponentLink1URL: N.A.; ComponentLink1Description: Datasheet; ComponentLink2URL: N.A.; ComponentLink2Description: Supplier link; HelpURL: N.A.; Supplier 1: N.A.; Supplier Part Number 1: N.A.; Supplier 2: N.A.; Supplier Part Number 2: N.A.; Component Class: Resistors; PartId: 100100001; Author: rsk; Part number Norautron: N.A.
footprint RESC0603X03L_C
pins: 1, 2

## R0201-1k0
designator R?, comment 1k
Resistor, ±1%, 0.05W; Part Number: R0201-1k0; Manufacturer: N.A.; Part number IPS: 00000005786; Part number NEMS: 100100043; Component Status: Active; Pad Count: 2; Note: Chip Res 1%; PartId: 100100043; Component Class: Resistors; Author: rsk; Manufacturer Part Number: N.A.; ComponentLink1URL: N.A.; ComponentLink1Description: Datasheet; ComponentLink2URL: N.A.; ComponentLink2Description: Supplier link; HelpURL: N.A.; LatestRevisionDate: 2014-11-13; Published: 2014-11-13; Footprint Doc: 0201; Value: 1k; Supplier 1: N.A.; Supplier Part Number 1: N.A.; Supplier 2: N.A.; Supplier Part Number 2: N.A.; Artikkelnr Noca: N.A.; Part number Norautron: N.A.
footprint RESC0603X03L_C
pins: 1, 2

## R0201-1k2
designator R?, comment 1k2
Resistor, ±1%, 0.05W; Part Number: R0201-1k2; Manufacturer: N.A.; Part number IPS: 00000001256; Part number Norautron: 26107084; Part number NEMS: 100100045; Note: Chip Res 1%; Pad Count: 2; Component Status: Active; Manufacturer Part Number: N.A.; ComponentLink1URL: N.A.; ComponentLink1Description: Datasheet; ComponentLink2URL: N.A.; ComponentLink2Description: Supplier link; HelpURL: N.A.; Footprint Doc: 0201; LatestRevisionDate: 2014-11-13; Published: 2014-11-13; Value: 1k2; Supplier 1: N.A.; Supplier Part Number 1: N.A.; Supplier 2: N.A.; Supplier Part Number 2: N.A.; Artikkelnr Noca: N.A.; PartId: 100100045; Component Class: Resistors; Author: rsk
footprint RESC0603X03L_C
pins: 1, 2

## R0201-1M0
designator R?, comment 1M0
Resistor, ±1%, 0.05W; Part Number: R0201-1M0; Manufacturer: N.A.; Part number IPS: 00000001418; Part number Norautron: 26107108; Part number NEMS: 100100093; Component Status: Active; Pad Count: 2; Note: Chip Res 1%; PartId: 100100093; Component Class: Resistors; Author: rsk; Manufacturer Part Number: N.A.; ComponentLink1URL: N.A.; ComponentLink1Description: Datasheet; ComponentLink2URL: N.A.; ComponentLink2Description: Supplier link; HelpURL: N.A.; LatestRevisionDate: 2014-11-13; Published: 2014-11-13; Footprint Doc: 0201; Value: 1M0; Supplier 1: N.A.; Supplier Part Number 1: N.A.; Supplier 2: N.A.; Supplier Part Number 2: N.A.; Artikkelnr Noca: N.A.
footprint RESC0603X03L_C
pins: 1, 2

## R0201-2k2
designator R?, comment 2k2
Resistor, ±1%, 0.05W; Part Number: R0201-2k2; Manufacturer: N.A.; Part number IPS: 00000001257; Part number Norautron: 26470030; Part number NEMS: 100100052; Note: Chip Res 1%; Pad Count: 2; Component Status: Active; Manufacturer Part Number: N.A.; ComponentLink1URL: N.A.; ComponentLink1Description: Datasheet; ComponentLink2URL: N.A.; ComponentLink2Description: Supplier link; HelpURL: N.A.; Footprint Doc: 0201; LatestRevisionDate: 2014-11-13; Published: 2014-11-13; Value: 2k2; Supplier 1: N.A.; Supplier Part Number 1: N.A.; Supplier 2: N.A.; Supplier Part Number 2: N.A.; Artikkelnr Noca: N.A.; PartId: 100100052; Component Class: Resistors; Author: rsk
footprint RESC0603X03L_C
pins: 1, 2

## R0201-2k7
designator R?, comment 2k7
Resistor, ±1%, 0.05W; Part Number: R0201-2k7; Manufacturer: N.A.; Part number Norautron: 26108481; Part number NEMS: 100100054; Component Status: Active; Pad Count: 2; Note: Chip Res 1%; PartId: 100100054; Component Class: Resistors; Author: rsk; Manufacturer Part Number: N.A.; ComponentLink1URL: N.A.; ComponentLink1Description: Datasheet; ComponentLink2URL: N.A.; ComponentLink2Description: Supplier link; HelpURL: N.A.; LatestRevisionDate: 2014-11-13; Published: 2014-11-13; Footprint Doc: 0201; Value: 2k7; Supplier 1: N.A.; Supplier Part Number 1: N.A.; Supplier 2: N.A.; Supplier Part Number 2: N.A.; Artikkelnr Noca: N.A.; Part number IPS: N.A.
footprint RESC0603X03L_C
pins: 1, 2

## R0201-4R7
designator R?, comment 4R7
Resistor, ±1%, 0.05W; Part Number: R0201-4R7; Manufacturer: N.A.; Part number IPS: 00000002486; Part number NEMS: 100100010; Component Status: Active; Pad Count: 2; Note: Chip Res 1%; PartId: 100100010; Component Class: Resistors; Author: rsk; Manufacturer Part Number: N.A.; ComponentLink1URL: N.A.; ComponentLink1Description: Datasheet; ComponentLink2URL: N.A.; ComponentLink2Description: Supplier link; HelpURL: N.A.; LatestRevisionDate: 2014-11-13; Published: 2014-11-13; Footprint Doc: 0201; Value: 4R7; Supplier 1: N.A.; Supplier Part Number 1: N.A.; Supplier 2: N.A.; Supplier Part Number 2: N.A.; Artikkelnr Noca: N.A.; Part number Norautron: N.A.
footprint RESC0603X03L_C
pins: 1, 2

## R0201-10k
designator R?, comment 10k
Resistor, ±1%, 0.05W; Part Number: R0201-10k; Manufacturer: N.A.; Part number IPS: 00000001255; Part number Norautron: 26107101; Part number NEMS: 100100065; Component Status: Active; Pad Count: 2; Note: Chip Res 1%; PartId: 100100065; Component Class: Resistors; Author: rsk; Manufacturer Part Number: N.A.; ComponentLink1URL: N.A.; ComponentLink1Description: Datasheet; ComponentLink2URL: N.A.; ComponentLink2Description: Supplier link; HelpURL: N.A.; LatestRevisionDate: 2014-11-13; Published: 2014-11-13; Footprint Doc: 0201; Value: 10k; Supplier 1: N.A.; Supplier Part Number 1: N.A.; Supplier 2: N.A.; Supplier Part Number 2: N.A.; Artikkelnr Noca: N.A.
footprint RESC0603X03L_C
pins: 1, 2

## R0201-10R
designator R?, comment 10R
Resistor, ±1%, 0.05W; Part Number: R0201-10R; Manufacturer: N.A.; Part number NEMS: 100100014; Component Status: Active; Pad Count: 2; Note: Chip Res 1%; PartId: 100100014; Component Class: Resistors; Author: rsk; Manufacturer Part Number: N.A.; ComponentLink1URL: N.A.; ComponentLink1Description: Datasheet; ComponentLink2URL: N.A.; ComponentLink2Description: Supplier link; HelpURL: N.A.; LatestRevisionDate: 2014-11-13; Published: 2014-11-13; Footprint Doc: 0201; Value: 10R; Supplier 1: N.A.; Supplier Part Number 1: N.A.; Supplier 2: N.A.; Supplier Part Number 2: N.A.; Artikkelnr Noca: N.A.; Part number IPS: N.A.; Part number Norautron: N.A.
footprint RESC0603X03L_C
pins: 1, 2

## R0201-100k
designator R?, comment 100k
Resistor, ±1%, 0.05W; Part Number: R0201-100k; Manufacturer: N.A.; Part number IPS: 00000001419; Part number Norautron: 26108487; Part number NEMS: 100100080; Note: Chip Res 1%; Pad Count: 2; Component Status: Active; Manufacturer Part Number: N.A.; Footprint Doc: 0201; LatestRevisionDate: 2014-11-13; Published: 2014-11-13; Value: 100k; Artikkelnr Noca: N.A.; ComponentLink1URL: N.A.; ComponentLink1Description: Datasheet; ComponentLink2URL: N.A.; ComponentLink2Description: Supplier link; HelpURL: N.A.; Supplier 1: N.A.; Supplier Part Number 1: N.A.; Supplier 2: N.A.; Supplier Part Number 2: N.A.; Component Class: Resistors; PartId: 100100080; Author: rsk
footprint RESC0603X03L_C
pins: 1, 2

## R0201-390
designator R?, comment 390R
Resistor, ±1%, 0.05W; Part Number: R0201-390; Manufacturer: N.A.; Part number IPS: 00000001258; Part number Norautron: 26470031; Part number NEMS: 100100035; Note: Chip Res 1%; Pad Count: 2; Component Status: Active; Manufacturer Part Number: N.A.; ComponentLink1URL: N.A.; ComponentLink1Description: Datasheet; ComponentLink2URL: N.A.; ComponentLink2Description: Supplier link; HelpURL: N.A.; Footprint Doc: 0201; LatestRevisionDate: 2014-11-13; Published: 2014-11-13; Value: 390R; Supplier 1: N.A.; Supplier Part Number 1: N.A.; Supplier 2: N.A.; Supplier Part Number 2: N.A.; Artikkelnr Noca: N.A.; PartId: 100100035; Component Class: Resistors; Author: rsk
footprint RESC0603X03L_C
pins: 1, 2

## RV2C010UNT2L
designator Q?
N-Channel MOSFET, 20V, 1A, 470mOhm, 400mW, -55°C ~ 150°C; Manufacturer: Rohm Semiconductor; Part number IPS: 00000009976; Part number Norautron: 26320026; Part number NEMS: 101300132; Component Status: Active; Pad Count: 3; Note: N.A.; Artikkelnr Noca: 35010020; Part Number: RV2C010UNT2L; PartId: 101300132; Component Class: Semiconductors; Author: rsk; Manufacturer Part Number: RV2C010UNT2L; ComponentLink1URL: N.A.; ComponentLink1Description: Datasheet; ComponentLink2URL: N.A.; ComponentLink2Description: Supplier link; HelpURL: http://rohmfs.rohm.com/en/products/databook/datasheet/discrete/transistor/mosfet/rv2c010unt2l-e.pdf; LatestRevisionDate: 2024-09-18; Published: 2016-08-09; Footprint Doc: DFN-3; Value: RV2C010UNT2L; Supplier 1: DigiKey; Supplier Part Number 1: RV2C010UNT2LCT-ND; Supplier 2: Mouser; Supplier Part Number 2: 755-RV2C010UNT2L
footprint DFN65P100X40-3L
pins: 1 G, 2 S, 3 D

## SKY13348-374LF
designator U?
50 MHz-6.0 GHz GaAs SPDT Switch; Manufacturer: Skyworks; Part number NEMS: 101900872; Component Status: Active; Pad Count: 6; Note: N.A.; Part Number: SKY13348-374LF; PartId: 101900872; Component Class: Misc_ICs; Author: rubr; Manufacturer Part Number: SKY13348-374LF; ComponentLink1URL: https://www.skyworksinc.com/-/media/E9327268CB16479EBC64472424698E70.pdf; ComponentLink1Description: Datasheet; ComponentLink2URL: https://www.digikey.com/en/products/detail/skyworks-solutions-inc/SKY13348-374LF/2658308; ComponentLink2Description: Supplier link; HelpURL: https://www.skyworksinc.com/Products/Switches/SKY13348-374LF; LatestRevisionDate: 2025-04-09; Published: 2025-04-09; Footprint Doc: XFDFN-6; Value: SKY13348-374LF; Supplier 1: DigiKey; Supplier Part Number 1: 863-1335-1-ND; Supplier 2: N.A.; Supplier Part Number 2: N.A.; Artikkelnr Noca: N.A.; Part number IPS: N.A.; Part number Norautron: N.A.
footprint SON50P150X50_HS-7N
pins: 1 V1 (in), 2 RFC (in), 3 V2 (in), 4 J2 (out), 5 GND (power), 6 J1 (out), 7 PAD (power)